# Altium footprint library Connectors.PcbLib: 113 footprints (part 3 of 8)
Each footprint in its own frame and in the unit in brackets; x right, y up, seen from the top. Pads: shape width x height; smd on the part's side, far side on the other; paste and mask are expansions set on the pad; w line width, h text height; cw(c..) or ccw(c..) is an arc to the next point about the centre after c.
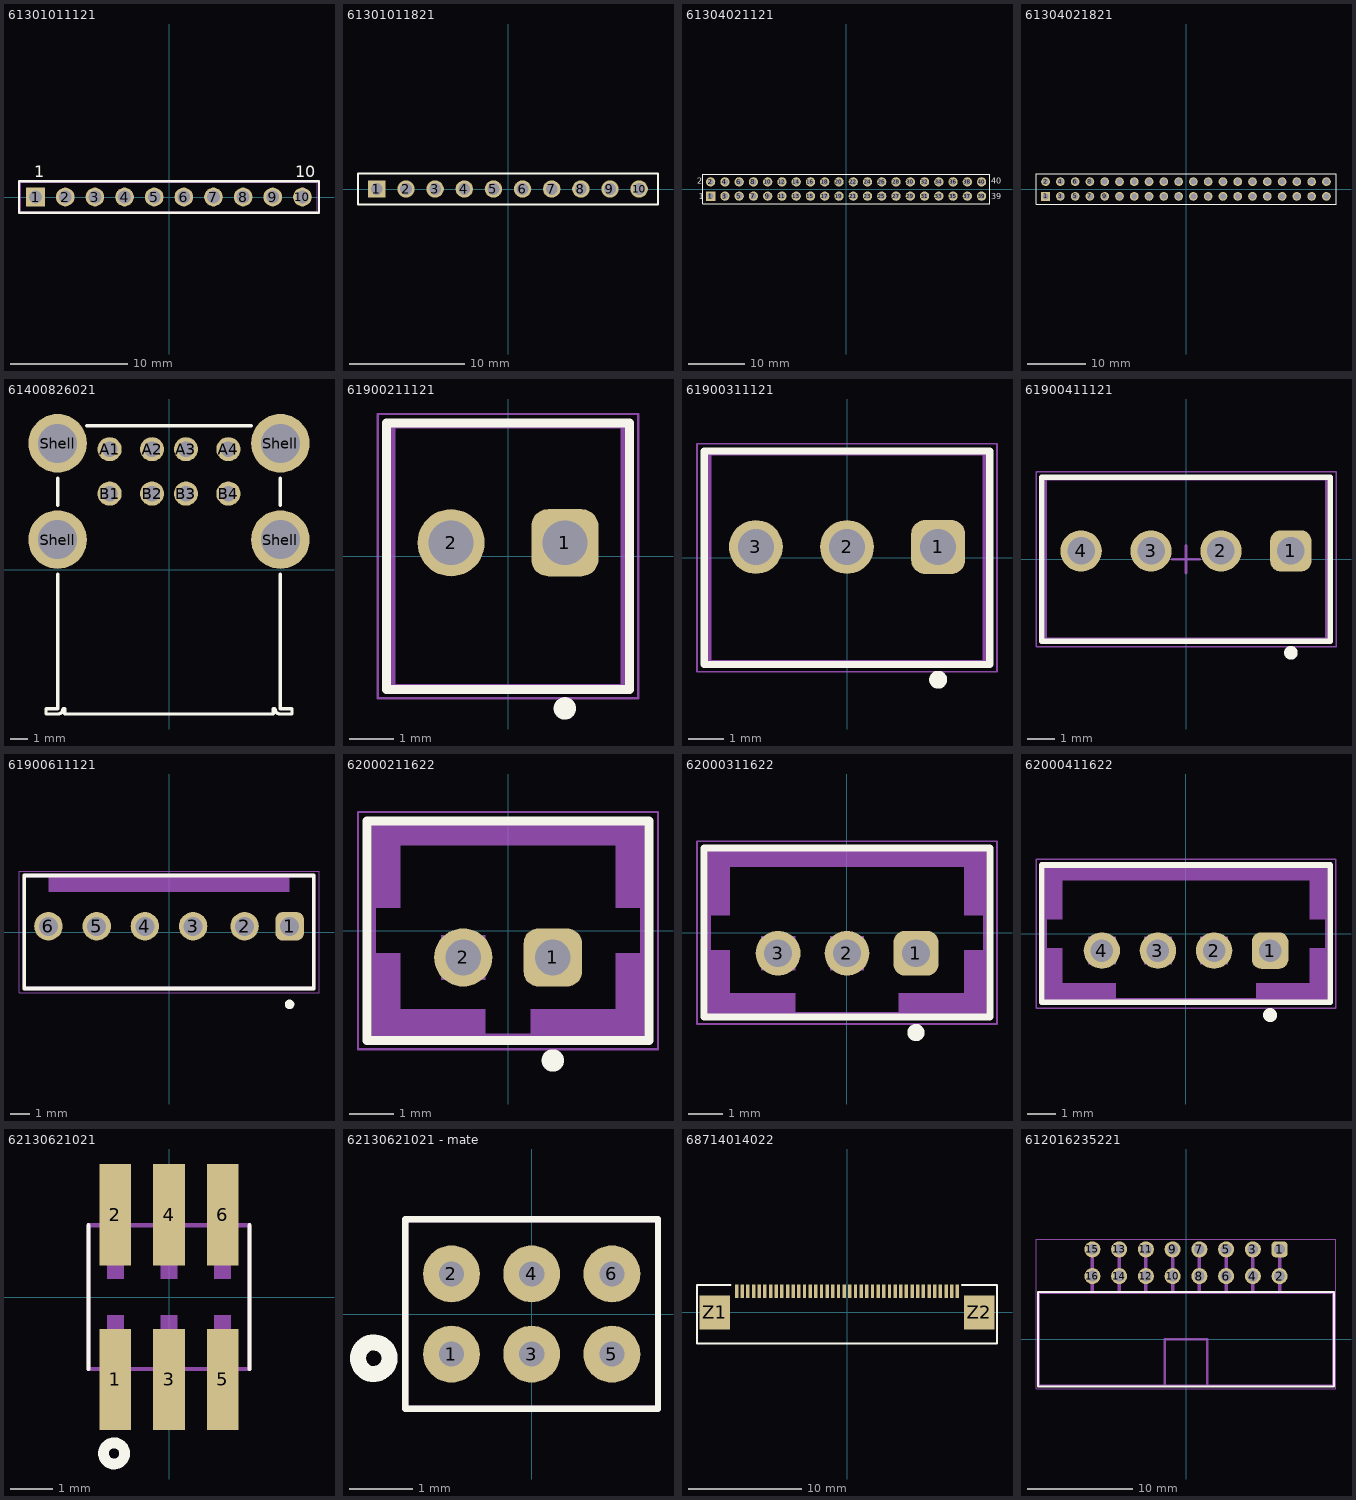
[diagram p2: the footprints below, top view; thin cyan lines are the x and y axes]

## 61301011121 [mm] "Pin Header, pitch 2.54 mm, THT, Vertical, single row, 10p"
height 8.54
pads (10):
  rect 1.6x1.6 hole 1.1: 1(-11.43,0)
  round 1.6 hole 1.1: 2(-8.89,0) 3(-6.35,0) 4(-3.81,0) 5(-1.27,0) 6(1.27,0) 7(3.81,0) 8(6.35,0) 9(8.89,0) 10(11.43,0)
Top Overlay:
  lines w0.2: -12.85,-1.345 12.85,-1.345 12.85,1.345 -12.85,1.345 -12.85,-1.345
  text "10" at 10.8,1.7 h1.02
  text "1" at -11.55,1.7 h1.02
Top Assembly:
  rectangle: -11.805,-0.375 -11.055,0.375
  rectangle: -9.265,-0.375 -8.515,0.375
  rectangle: -6.725,-0.375 -5.975,0.375
  rectangle: -4.185,-0.375 -3.435,0.375
  rectangle: -1.645,-0.375 -0.895,0.375
  rectangle: 0.895,-0.375 1.645,0.375
  rectangle: 3.435,-0.375 4.185,0.375
  rectangle: 5.975,-0.375 6.725,0.375
  rectangle: 8.515,-0.375 9.265,0.375
  rectangle: 11.055,-0.375 11.805,0.375
  lines w0.1: -12.7,-1.27 -12.7,1.27 12.7,1.27 12.7,-1.27 -12.7,-1.27
  text "10" at 11.055,-1.05 h0.5
  text "9" at 8.723,-1.05 h0.5
  text "8" at 6.183,-1.05 h0.5
  text "7" at 3.643,-1.05 h0.5
  text "6" at 1.103,-1.05 h0.5
  text "5" at -1.437,-1.05 h0.5
  text "1" at -11.513,-1.05 h0.5
  text "4" at -3.977,-1.05 h0.5
  text "3" at -6.517,-1.05 h0.5
  text "2" at -9.057,-1.05 h0.5
  text ".Designator" at -0.233,3.499 h0.7
3D body "61301011121.stp": height 8.57, standoff -2.97, extent -12.7,-1.27 12.7,1.27

## 61301011821 [mm] "Socket Header, Pitch 2.54 mm, THT, Vertical, single row, 10p"
height 8.5
pads (10):
  rect 1.52x1.52 hole 1.02: 1(-11.43,0)
  round 1.52 hole 1.02: 2(-8.89,0) 3(-6.35,0) 4(-3.81,0) 5(-1.27,0) 6(1.27,0) 7(3.81,0) 8(6.35,0) 9(8.89,0) 10(11.43,0)
Top Overlay:
  lines w0.2: -13.075,-1.35 13.075,-1.35 13.075,1.35 -13.075,1.35 -13.075,-1.35
3D body "61301011821.stp": height 8.55, standoff -3.06, extent -12.95,-1.25 12.95,1.25

## 61304021121 [mm] "Pin Header, pitch 2.54 mm, THT, Vertical, dual row, 40p"
height 8.54
pads (40):
  rect 1.65x1.65 hole 1.1: 1(-24.13,-1.27)
  round 1.65 hole 1.1: 2(-24.13,1.27) 3(-21.59,-1.27) 4(-21.59,1.27) 5(-19.05,-1.27) 6(-19.05,1.27) 7(-16.51,-1.27) 8(-16.51,1.27) 9(-13.97,-1.27) 10(-13.97,1.27) 11(-11.43,-1.27) 12(-11.43,1.27) 13(-8.89,-1.27) 14(-8.89,1.27) 15(-6.35,-1.27) 16(-6.35,1.27) 17(-3.81,-1.27) 18(-3.81,1.27) 19(-1.27,-1.27) 20(-1.27,1.27) 21(1.27,-1.27) 22(1.27,1.27) 23(3.81,-1.27) 24(3.81,1.27) 25(6.35,-1.27) 26(6.35,1.27) 27(8.89,-1.27) 28(8.89,1.27) 29(11.43,-1.27) 30(11.43,1.27) 31(13.97,-1.27) 32(13.97,1.27) 33(16.51,-1.27) 34(16.51,1.27) 35(19.05,-1.27) 36(19.05,1.27) 37(21.59,-1.27) 38(21.59,1.27) 39(24.13,-1.27) 40(24.13,1.27)
Top Overlay:
  lines w0.2: -25.55,-2.615 -25.55,2.615 25.55,2.615 25.55,-2.615 -25.55,-2.615
  text "40" at 25.86,0.9 h1.02
  text "39" at 25.86,-1.8 h1.02
  text "1" at -26.26,-1.8 h1.02
  text "2" at -26.56,0.9 h1.02
3D body "61304021121.stp": height 8.59, standoff -2.95, extent -25.4,-2.54 25.4,2.54

## 61304021821 [mm] "Socket Header, Pitch 2.54 mm, THT, Vertical, dual row, 40p"
height 8.4
pads (40):
  rect 1.5x1.5 hole 1.02: 1(-24.13,-1.27)
  round 1.5 hole 1.02: 2(-24.13,1.27) 3(-21.59,-1.27) 4(-21.59,1.27) 5(-19.05,-1.27) 6(-19.05,1.27) 7(-16.51,-1.27) 8(-16.51,1.27) 9(-13.97,-1.27) 10(-13.97,1.27) 11(-11.43,-1.27) 12(-11.43,1.27) 13(-8.89,-1.27) 14(-8.89,1.27) 15(-6.35,-1.27) 16(-6.35,1.27) 17(-3.81,-1.27) 18(-3.81,1.27) 19(-1.27,-1.27) 20(-1.27,1.27) 21(1.27,-1.27) 22(1.27,1.27) 23(3.81,-1.27) 24(3.81,1.27) 25(6.35,-1.27) 26(6.35,1.27) 27(8.89,-1.27) 28(8.89,1.27) 29(11.43,-1.27) 30(11.43,1.27) 31(13.97,-1.27) 32(13.97,1.27) 33(16.51,-1.27) 34(16.51,1.27) 35(19.05,-1.27) 36(19.05,1.27) 37(21.59,-1.27) 38(21.59,1.27) 39(24.13,-1.27) 40(24.13,1.27)
Top Overlay:
  lines w0.2: -25.775,-2.615 -25.775,2.615 25.775,2.615 25.775,-2.615 -25.775,-2.615
3D body "61304021821.stp": height 8.45, standoff -3.05, extent -25.65,-2.54 25.65,2.54

## 61400826021 [mm] "USB 2.0 Type A Horizontal Dual Stacked"
height 15.34
pads (12):
  round 1.42 hole 0.92: A1(-3.5,7.11) A2(-1,7.11) A3(1,7.11) A4(3.5,7.11) B1(-3.5,4.49) B2(-1,4.49) B3(1,4.49) B4(3.5,4.49)
  round 3.45 hole 2.3: Shell(-6.57,1.78) Shell(-6.57,7.46) Shell(6.57,1.78) Shell(6.57,7.46)
Top Overlay:
  lines w0.2: -6.55,-0.25 -6.55,-8.2 -7.25,-8.2 -7.25,-8.5 -6.56,-8.5 ccw(c-6.55,-8.2) -6.25,-8.2 -6.15,-8.2 -6.15,-8.5 6.15,-8.5 6.15,-8.2 6.25,-8.2 ccw(c6.55,-8.2) 6.56,-8.5 7.25,-8.5 7.25,-8.2 6.55,-8.2 6.55,-0.25 ; -6.55,3.81 -6.55,5.4 ; -4.85,8.5 4.85,8.5 ; 6.55,3.81 6.55,5.4
3D body "61400826021.stp": height 15.99, standoff -3.86, extent -7.913,-8.5 7.913,8.65

## 61900211121 [mm] "2.54mm Male Locking Header, 2p"
height 11.5
pads (2):
  rrect50% 1.5x1.5 hole 1: 1(1.27,0.3)
  round 1.5 hole 1: 2(-1.27,0.3)
Top Overlay:
  circle w0.25: c1.27,-3.4 r0.125
  lines w0.2: -2.71,-2.975 2.71,-2.975 2.71,2.975 -2.71,2.975 -2.71,-2.975
Top Assembly:
  lines w0.1: -2.56,-2.9 -2.56,2.9 2.56,2.9 2.56,-2.9 -2.56,-2.9
  text ".Designator" at -4.998,-1.833 h1
Mechanical 15:
  lines w0.05: -2.91,-3.175 2.91,-3.175 2.91,3.175 -2.91,3.175 -2.91,-3.175
3D body "61900211121.stp": height 11.53, standoff -3.37, extent -2.54,-2.9 2.54,2.9

## 61900311121 [mm] "2.54mm Male Locking Header, 3p"
height 11.5
pads (3):
  rrect50% 1.5x1.5 hole 1: 1(2.54,0.3)
  round 1.5 hole 1: 2(0,0.3) 3(-2.54,0.3)
Top Overlay:
  circle w0.25: c2.54,-3.4 r0.125
  lines w0.2: -3.98,-2.975 -3.98,2.975 3.98,2.975 3.98,-2.975 -3.98,-2.975
Top Assembly:
  lines w0.1: -3.83,-2.9 3.83,-2.9 3.83,2.9 -3.83,2.9 -3.83,-2.9
  text ".Designator" at -4.998,-1.833 h1
Mechanical 15:
  lines w0.05: -4.18,-3.175 -4.18,3.175 4.18,3.175 4.18,-3.175 -4.18,-3.175
3D body "61900311121.stp": height 11.53, standoff -3.37, extent -3.81,-2.9 3.81,2.9

## 61900411121 [mm] "2.54mm Male Locking Header, 4p"
height 11.5
pads (4):
  rrect50% 1.5x1.5 hole 1: 1(3.81,0.3)
  round 1.5 hole 1: 2(1.27,0.3) 3(-1.27,0.3) 4(-3.81,0.3)
Top Overlay:
  circle w0.25: c3.81,-3.4 r0.125
  lines w0.2: -5.25,-2.975 5.25,-2.975 5.25,2.975 -5.25,2.975 -5.25,-2.975
Top Assembly:
  lines w0.1: -5.1,-2.9 -5.1,2.9 5.1,2.9 5.1,-2.9 -5.1,-2.9
  text ".Designator" at -4.998,-1.833 h1
Mechanical 15:
  lines w0.05: -5.45,-3.175 -5.45,3.175 5.45,3.175 5.45,-3.175 -5.45,-3.175
Top Component Center:
  lines w0.1: -0.5,0 0.5,0 ; 0,-0.5 0,0.5
3D body "61900411121.stp": height 11.53, standoff -3.37, extent -5.08,-2.9 5.08,2.9

## 61900611121 [mm] "2.54mm Male Locking Header, 6p"
height 11.5
pads (6):
  rrect50% 1.5x1.5 hole 1: 1(6.35,0.3)
  round 1.5 hole 1: 2(3.98,0.3) 3(1.27,0.3) 4(-1.27,0.3) 5(-3.81,0.3) 6(-6.35,0.3)
Top Overlay:
  circle w0.25: c6.35,-3.81 r0.125
  lines w0.2: -7.62,-2.975 -7.62,2.975 7.62,2.975 7.62,-2.975 -7.62,-2.975
Top Assembly:
  rectangle: -6.35,2.1 6.35,2.9
  lines w0.2: -7.62,-2.975 7.62,-2.975 7.62,2.975 -7.62,2.975 -7.62,-2.975
  text ".Designator" at -4.998,-1.833 h1
Mechanical 15:
  lines w0.05: -7.9,-3.2 -7.9,3.2 7.9,3.2 7.9,-3.2 -7.9,-3.2
3D body "61900611121 (rev1).stp": height 11.53, standoff -3.37, extent -7.62,-2.9 7.62,2.9

## 62000211622 [mm] "2.00mm Male Vertical Shrouded Header, 2p"
height 6.1
pads (2):
  rrect50% 1.3x1.3 hole 0.8: 1(1,-0.6)
  round 1.3 hole 0.8: 2(-1,-0.6)
Top Overlay:
  circle w0.25: c1,-2.9 r0.125
  lines w0.2: -3.15,-2.45 -3.15,2.45 3.15,2.45 3.15,-2.45 -3.15,-2.45
Top Assembly:
  region: -2.4,2.35 -3,2.35 -3,0.5 -2.4,0.5
  rectangle: 2.4,-2.35 3,-0.5
  region: -2.4,-0.5 -3,-0.5 -3,-2.35 -2.4,-2.35
  region: 3,-1.75 0.5,-1.75 0.5,-2.35 3,-2.35
  rectangle: 0.5,-1.1 1.5,-0.1
  rectangle: -1.5,-1.1 -0.5,-0.1
  rectangle: -2.7,1.9 3,2.35
  rectangle: 2.4,0.5 3,2.35
  rectangle: -3,-2.35 -0.5,-1.75
  lines w0.1: -3,-2.35 3,-2.35 3,2.35 -3,2.35 -3,-2.35
  text ".Designator" at -4.998,0.567 h1
Mechanical 15:
  lines w0.05: -3.35,-2.65 -3.35,2.65 3.35,2.65 3.35,-2.65 -3.35,-2.65
3D body "62000211622.stp": height 6.13, standoff -3.36, extent -3,-2.35 3,2.35

## 62000311622 [mm] "2.00mm Male Vertical Shrouded Header, 3p"
height 6.1
pads (3):
  rrect50% 1.3x1.3 hole 0.8: 1(2,-0.6)
  round 1.3 hole 0.8: 2(0,-0.6) 3(-2,-0.6)
Top Overlay:
  circle w0.25: c2,-2.9 r0.125
  lines w0.2: -4.15,-2.45 -4.15,2.45 4.15,2.45 4.15,-2.45 -4.15,-2.45
Top Assembly:
  rectangle: 1.5,-1.1 2.5,-0.1
  rectangle: -2.5,-1.1 -1.5,-0.1
  rectangle: -3.6,1.9 4,2.35
  rectangle: 3.4,0.5 4,2.35
  region: -3.4,2.35 -4,2.35 -4,0.5 -3.4,0.5
  rectangle: 3.4,-2.35 4,-0.5
  region: -3.4,-0.5 -4,-0.5 -4,-2.35 -3.4,-2.35
  region: 4,-1.75 1.5,-1.75 1.5,-2.35 4,-2.35
  rectangle: -0.5,-1.1 0.5,-0.1
  rectangle: -4,-2.35 -1.5,-1.75
  lines w0.1: -3,-2.35 3,-2.35 ; -3,2.35 3,2.35 ; -4,-2.35 4,-2.35 4,2.35 -4,2.35 -4,-2.35
  text ".Designator" at -4.998,0.567 h1
Mechanical 15:
  lines w0.05: -4.35,-2.65 -4.35,2.65 4.35,2.65 4.35,-2.65 -4.35,-2.65
3D body "62000311622.stp": height 6.13, standoff -3.37, extent -4,-2.35 4,2.35

## 62000411622 [mm] "2.00mm Male Vertical Shrouded Header, 4p"
height 6.1
pads (4):
  rrect50% 1.3x1.3 hole 0.8: 1(3,-0.6)
  round 1.3 hole 0.8: 2(1,-0.6) 3(-1,-0.6) 4(-3,-0.6)
Top Overlay:
  circle w0.25: c3,-2.9 r0.125
  lines w0.2: -5.15,-2.45 -5.15,2.45 5.15,2.45 5.15,-2.45 -5.15,-2.45
Top Assembly:
  rectangle: 2.5,-1.1 3.5,-0.1
  rectangle: 0.5,-1.1 1.5,-0.1
  region: -4.4,2.35 -5,2.35 -5,0.5 -4.4,0.5
  rectangle: -3.5,-1.1 -2.5,-0.1
  rectangle: -4.7,1.9 4.7,2.35
  rectangle: 4.4,0.5 5,2.35
  rectangle: 4.4,-2.35 5,-0.5
  region: -4.4,-0.5 -5,-0.5 -5,-2.35 -4.4,-2.35
  region: 5,-1.75 2.5,-1.75 2.5,-2.35 5,-2.35
  rectangle: -1.5,-1.1 -0.5,-0.1
  rectangle: -5,-2.35 -2.5,-1.75
  lines w0.1: -4,-2.35 4,-2.35 ; -4,2.35 4,2.35 ; -3,-2.35 3,-2.35 ; -3,2.35 3,2.35 ; -5,-2.35 5,-2.35 5,2.35 -5,2.35 -5,-2.35
  text ".Designator" at -4.998,0.567 h1
Mechanical 15:
  lines w0.05: -5.35,-2.65 5.35,-2.65 5.35,2.65 -5.35,2.65 -5.35,-2.65
3D body "62000411622.stp": height 6.13, standoff -3.37, extent -5,-2.35 5,2.35

## 62130621021 [mm] "Pin Header, pitch 1.27 mm, SMD, Vertical, dual row, 6p"
height 6.1
pads (6):
  rect 0.75x2.4 smd: 1(-1.27,-1.95) 2(-1.27,1.95) 3(0,-1.95) 4(0,1.95) 5(1.27,-1.95) 6(1.27,1.95)
Top Overlay:
  circle w0.254: c-1.3,-3.7 r0.25
  lines w0.1: -1.905,-1.7 -1.905,1.7 ; 1.905,-1.7 1.905,1.7
Top Assembly:
  rectangle: -1.47,1.7 -1.07,2.5
  rectangle: -0.2,1.7 0.2,2.5
  rectangle: 1.07,1.7 1.47,2.5
  rectangle: 1.07,-2.5 1.47,-1.7
  rectangle: -0.2,-2.5 0.2,-1.7
  rectangle: -1.47,-2.5 -1.07,-1.7
  rectangle: -1.47,0.425 -1.07,0.825
  rectangle: -0.2,0.425 0.2,0.825
  rectangle: 1.07,0.425 1.47,0.825
  region: 1.47,-0.425 1.07,-0.425 1.07,-0.825 1.47,-0.825
  region: 0.2,-0.425 -0.2,-0.425 -0.2,-0.825 0.2,-0.825
  region: -1.07,-0.425 -1.47,-0.425 -1.47,-0.825 -1.07,-0.825
  lines w0.1: -1.47,-1.7 -1.47,-2.5 -1.07,-2.5 -1.07,-1.7 ; -1.47,1.7 -1.47,2.5 -1.07,2.5 -1.07,1.7 ; -0.2,-1.7 -0.2,-2.5 0.2,-2.5 0.2,-1.7 ; -0.2,1.7 -0.2,2.5 0.2,2.5 0.2,1.7 ; 1.07,-1.7 1.07,-2.5 1.47,-2.5 1.47,-1.7 ; 1.07,1.7 1.07,2.5 1.47,2.5 1.47,1.7 ; -1.905,-1.7 -1.905,1.7 1.905,1.7 1.905,-1.7 -1.905,-1.7
  text ".Designator" at -2.499,-0.167 h0.5
3D body "62130621021.stp": height 5.9, standoff 0, extent -1.905,-2.55 1.905,2.55

## 62130621021 - mate [mm] "Pin Header, pitch 1.27 mm, SMD, Vertical, dual row, 6p"
height 6.1
pads (6):
  round 0.9 hole 0.4: 1(-1.27,-0.635) 2(-1.27,0.635) 3(0,-0.635) 4(0,0.635) 5(1.27,-0.635) 6(1.27,0.635)
Top Overlay:
  circle w0.254: c-2.5,-0.7 r0.25
  lines w0.1: -2,-1.5 -2,1.5 2,1.5 2,-1.5 -2,-1.5
Top Assembly:
  rectangle: -0.2,0.435 0.2,0.835
  rectangle: -1.47,0.435 -1.07,0.835
  rectangle: 1.07,0.435 1.47,0.835
  rectangle: 1.07,-0.835 1.47,-0.435
  rectangle: -0.2,-0.835 0.2,-0.435
  rectangle: -1.47,-0.835 -1.07,-0.435
  lines w0.1: -2,-1.5 -2,1.5 2,1.5 2,-1.5 -2,-1.5
  text ".Designator" at -2.499,-0.167 h0.5

## 68714014022 [mm]
pads (42):
  rect 0.3x1.2 smd: 1(-9.75,1.86) 2(-9.25,1.86) 3(-8.75,1.86) 4(-8.25,1.86) 5(-7.75,1.86) 6(-7.25,1.86) 7(-6.75,1.86) 8(-6.25,1.86) 9(-5.75,1.86) 10(-5.25,1.86) 11(-4.75,1.86) 12(-4.25,1.86) 13(-3.75,1.86) 14(-3.25,1.86) 15(-2.75,1.86) 16(-2.25,1.86) 17(-1.75,1.86) 18(-1.25,1.86) 19(-0.75,1.86) 20(-0.25,1.86) 21(0.25,1.86) 22(0.75,1.86) 23(1.25,1.86) 24(1.75,1.86) 25(2.25,1.86) 26(2.75,1.86) 27(3.25,1.86) 28(3.75,1.86) 29(4.25,1.86) 30(4.75,1.86) 31(5.25,1.86) 32(5.75,1.86) 33(6.25,1.86) 34(6.75,1.86) 35(7.25,1.86) 36(7.75,1.86) 37(8.25,1.86) 38(8.75,1.86) 39(9.25,1.86) 40(9.75,1.86)
  rect 2.7x3 smd: Z1(-11.68,0) Z2(11.68,0)
Top Overlay:
  lines w0.2: -10.287,2.413 -13.25,2.413 -13.25,1.56 -13.25,-2.74 13.25,-2.74 13.25,1.56 13.25,2.413 10.16,2.413
3D body "68714014022 (rev1).stp": height 2.11, standoff 0.01, extent -13.2,-2.8 13.2,2.3

## 612016235221 [mm] "16 pins, right angled, gold plating, High Temperature"
height 9.05
pads (16):
  rrect50% 1.52x1.52 hole 1.02: 1(8.89,8.54)
  round 1.52 hole 1.02: 2(8.89,6) 3(6.35,8.54) 4(6.35,6) 5(3.81,8.54) 6(3.81,6) 7(1.27,8.54) 8(1.27,6) 9(-1.27,8.54) 10(-1.27,6) 11(-3.81,8.54) 12(-3.81,6) 13(-6.35,8.54) 14(-6.35,6) 15(-8.89,8.54) 16(-8.89,6)
Top Overlay:
  lines w0.2: -14.05,-4.5 14.05,-4.5 14.05,4.5 -14.05,4.5 -14.05,-4.5
Top Assembly:
  rectangle: 8.719,4.4 9.061,8.54
  rectangle: 6.179,4.4 6.521,8.54
  rectangle: 3.639,4.4 3.981,8.54
  rectangle: 1.099,4.4 1.441,8.54
  rectangle: -1.441,4.4 -1.099,8.54
  rectangle: -3.981,4.4 -3.639,8.54
  rectangle: -6.521,4.4 -6.179,8.54
  rectangle: -9.061,4.4 -8.719,8.54
  lines w0.2: -2.018,-4.4 -2.018,0 0,0 2.018,0 2.018,-4.4 ; -13.95,-4.4 -13.95,4.4 13.95,4.4 13.95,-4.4 -13.95,-4.4
  text ".Designator" at -3.647,-0.357 h1
Mechanical 15:
  lines w0.05: -14.25,-4.7 -14.25,9.5 14.25,9.5 14.25,-4.7 -14.25,-4.7
3D body "612016235221.stp": height 9.1, standoff -3.1, extent -13.99,-4.4 13.99,8.86